# Altium footprint library RCW_PcbLib.PcbLib: 61 footprints (part 2 of 4)
Each footprint in its own frame and in the unit in brackets; x right, y up, seen from the top. Pads: shape width x height; smd on the part's side, far side on the other; paste and mask are expansions set on the pad; w line width, h text height; cw(c..) or ccw(c..) is an arc to the next point about the centre after c.
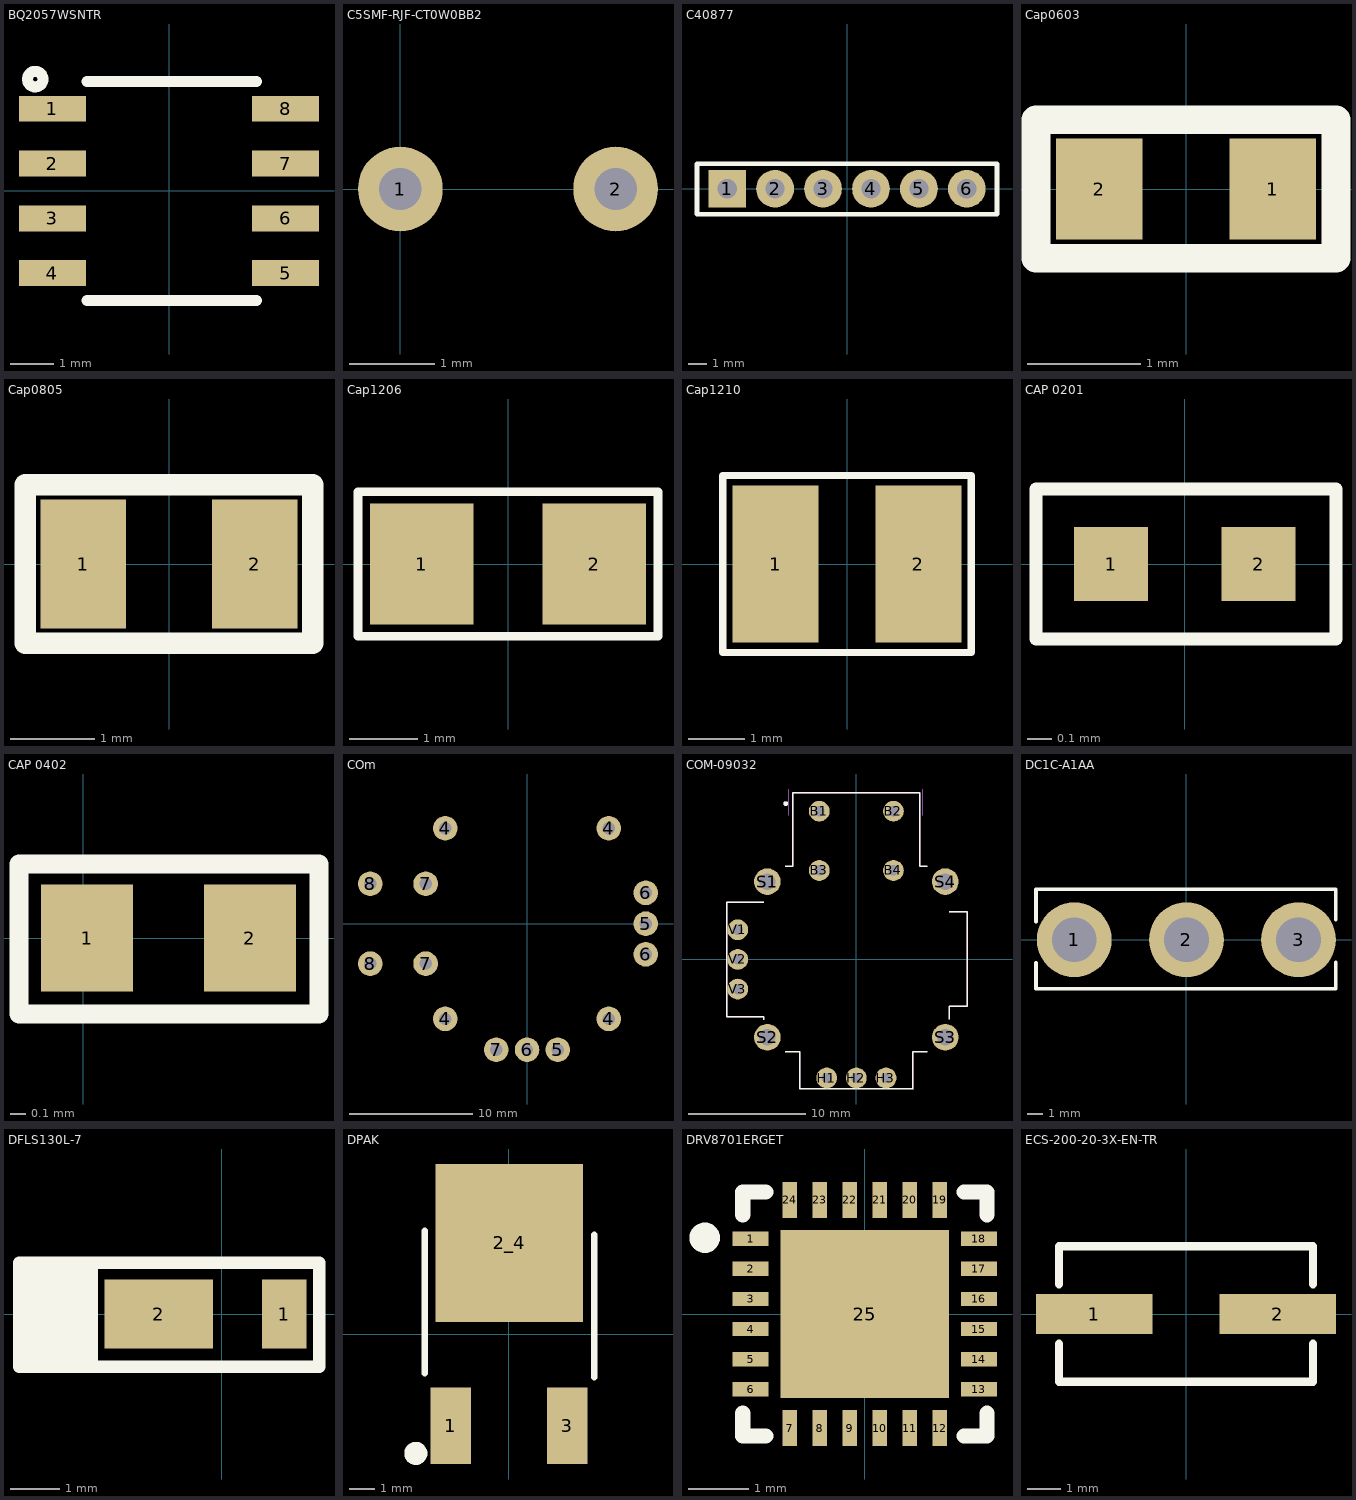
[diagram p1: the footprints below, top view; thin cyan lines are the x and y axes]

## BQ2057WSNTR [mm]
pads (8):
  rect 1.55x0.6 smd: 1(-2.7,1.905) 2(-2.7,0.635) 3(-2.7,-0.635) 4(-2.7,-1.905) 5(2.7,-1.905) 6(2.7,-0.635) 7(2.7,0.635) 8(2.7,1.905)
Top Overlay:
  circle w0.254: c-3.099,2.591 r0.18
  lines w0.254: -1.905,-2.54 2.032,-2.54 ; -1.905,2.54 2.032,2.54
3D body "User Library-SOIC-8-1.STEP": height 1.65, standoff -0.1, extent -2.906,-2.413 3.094,2.487

## C5SMF-RJF-CT0W0BB2 [mm] "LED RED CLEAR 5MM OVAL T/H"
pads (2):
  round 1 hole 0.5: 1(0,0) 2(2.54,0)
3D body "xhp-70.stp": height 0.58, standoff -3.91, extent -2.56,-3.475 4.44,3.525

## C40877 [mm] "Female Header Female Socket 0.100\"(2.54mm)"
pads (6):
  rect 2x2 hole 1.02: 1(-6.35,0)
  round 2 hole 1.02: 2(-3.81,0) 3(-1.27,0) 4(1.27,0) 5(3.81,0) 6(6.35,0)
Top Overlay:
  lines w0.254: -7.95,-1.346 -7.95,1.321 7.95,1.321 7.95,-1.346 -7.95,-1.346
3D body "User Library-Header_Fem_1X6.STEP": height 8.5, standoff -3.2, extent -7.87,-1.27 7.87,1.27

## Cap0603 [mil]
pads (2):
  rect 30x35 smd: 1(30,0) 2(-30,0)
Top Overlay:
  lines w10: -52,-24 -52,24 52,24 52,-24 -52,-24
3D body "User Library-CAPC1608X09.step": height 34.25, standoff -1.18, extent -31.49,-15.74 31.51,15.76

## Cap0805 [mil] "SMD 0805"
pads (2):
  rect 40x60 smd: 1(-40,0) 2(40,0)
Top Overlay:
  lines w10: -67,-37 67,-37 67,37 -67,37 -67,-37
3D body "User Library-0805 SMD Capacitor.step": height 30, standoff -0.79, extent -39.36,-24.6 39.38,24.61

## Cap1206 [mil] "SMD 1206"
pads (2):
  rect 60x70 smd: 1(-50,0) 2(50,0)
Top Overlay:
  lines w5: -87,-42 87,-42 87,42 -87,42 -87,-42
3D body "User Library-1206 SMD Capacitor.step": height 39.45, standoff 0, extent -62.96,-31.46 63.03,31.53

## Cap1210 [mil] "SMD 1210"
pads (2):
  rect 60x110 smd: 1(-50,0) 2(50,0)
Top Overlay:
  lines w5: -87,-62 87,-62 87,62 -87,62 -87,-62
3D body "User Library-CAPC3225X10.step": height 39.37, standoff 0, extent -62.99,-49.21 63,49.22

## CAP 0201 [mm]
pads (2):
  rect 0.3x0.3 smd: 1(-0.3,0) 2(0.3,0)
Top Overlay:
  lines w0.054: -0.605,-0.305 0.614,-0.305 0.614,0.305 -0.605,0.305 -0.605,-0.305
3D body "User Library-SMD Ceramic Capacitors_0201 (0603)_AB.STEP": height 0.28, standoff -0.02, extent -0.3,-0.15 0.301,0.15

## CAP 0402 [mm] "CC0402JRNPO9BN330"
pads (2):
  rect 0.6x0.7 smd: 1(0.025,0) 2(1.085,0)
Top Overlay:
  lines w0.127: -0.419,-0.495 1.537,-0.495 1.537,0.483 -0.419,0.483 -0.419,-0.495
3D body "0402.step": height 0.56, standoff 0, extent -0.007,-0.286 1.111,0.324

## COm [mm]
pads (14):
  round 2 hole 1: 4(-6.65,-7.75) 4(-6.65,7.75) 4(6.65,-7.75) 4(6.65,7.75) 5(2.5,-10.25) 5(9.65,0) 6(0,-10.25) 6(9.65,-2.5) 6(9.65,2.5) 7(-8.25,-3.25) 7(-8.25,3.25) 7(-2.5,-10.25) 8(-12.75,-3.25) 8(-12.75,3.25)
3D body "COM-09032--3DModel-STEP-56544.STEP": height 30.23, standoff -4.44, extent -14.337,-13.357 13.27,13.31

## COM-09032 [mil]
pads (14):
  round 70 hole 35.43: B1(-125,500) B2(125,500) B3(-125,300) B4(125,300)
  round 70 hole 35: H1(-100,-400) H2(0,-400) H3(100,-400) V1(-400,100) V2(-400,0) V3(-400,-100)
  round 90 hole 55: S1(-300,262.5) S2(-300,-262.5) S3(300,-262.5) S4(300,262.5)
Top Overlay:
  circle w7.87: c-238.19,525.59 r3.94
  lines w5: -312.99,-203.54 -312.99,-192.91 -437.01,-192.91 -437.01,192.91 -312.99,192.91 ; -238.98,-311.02 -190.94,-311.02 -190.94,-437 190.94,-437 190.94,-311.02 239.37,-311.02 ; -238.98,314.96 -214.57,314.96 -214.57,562.99 214.57,562.99 214.57,314.96 239.37,314.96 ; 312.99,-201.57 312.99,-157.48 374.02,-157.48 374.02,161.42 312.99,161.42
Mechanical 13:
  circle w7.87: c-238.19,525.59 r3.94
  lines w5: -312.99,-192.91 -437.01,-192.91 -437.01,192.91 -312.99,192.91 ; -214.57,314.96 -214.57,562.99 214.57,562.99 214.57,314.96 ; -190.94,-437.01 -190.94,-311.02 ; 190.94,-437.01 190.94,-311.02 ; 312.99,-157.48 374.02,-157.48 374.02,161.42 312.99,161.42
Mechanical 15:
  lines w1.97: -228.35,486.22 -228.35,574.8 ; 224.41,486.22 224.41,574.8
3D body "COM-09032--3DModel-STEP-56544.STEP": height 1190, standoff -175, extent -531.43,-552.86 518.44,534

## DC1C-A1AA [mm]
pads (3):
  round 5 hole 3: 1(-7.5,0) 2(0,0) 3(7.5,0)
Top Overlay:
  lines w0.254: -10.058,-1.549 -10.058,-3.277 9.982,-3.277 9.982,-1.524 ; -10.058,1.219 -10.058,3.378 9.982,3.378 9.982,1.346
3D body "46867.stp": height 12.01, standoff -2.7, extent -9.95,-3.175 9.9,3.275

## DFLS130L-7 [mm] "30V 1A 310mV @ 1A PowerDI 123 Schottky Barrier Diodes (SBD) RoHS"
pads (2):
  rect 0.9x1.4 smd: 1(1.275,0)
  rect 2.2x1.4 smd: 2(-1.275,0)
Top Overlay:
  rectangle: -4.115,-1.067 -2.515,1.041
  lines w0.254: -4.115,-1.067 -4.115,1.041 1.981,1.041 1.981,-1.067 -4.115,-1.067
3D body "User Library-powerdi123.STEP": height 1, standoff 0, extent -2.256,-0.965 1.619,0.965

## DPAK [mm] "TRANS PNP 100V 3A DPAK"
pads (3):
  rect 1.6x3 smd: 1(-2.285,-3.59) 3(2.285,-3.59)
  rect 5.8x6.2 smd: 2_4(0.007,3.59)
Top Overlay:
  circle w0.5: c-3.658,-4.674 r0.203
  lines w0.254: -3.302,-1.524 -3.302,4.064 ; 3.353,-1.676 3.353,3.912
3D body "User Library-DPAK-1.STEP": height 2.39, standoff -0.02, extent -3.27,-4.287 3.27,5.651

## DRV8701ERGET [mm] "Motor Driver Power MOSFET Parallel 24-VQFN (4x4)"
pads (25):
  rect 0.6x0.24 smd: 1(-1.9,1.25) 2(-1.9,0.75) 3(-1.9,0.25) 4(-1.9,-0.25) 5(-1.9,-0.75) 6(-1.9,-1.25) 13(1.9,-1.25) 14(1.9,-0.75) 15(1.9,-0.25) 16(1.9,0.25) 17(1.9,0.75) 18(1.9,1.25)
  rect 0.24x0.6 smd: 7(-1.25,-1.9) 8(-0.75,-1.9) 9(-0.25,-1.9) 10(0.25,-1.9) 11(0.75,-1.9) 12(1.25,-1.9) 19(1.25,1.9) 20(0.75,1.9) 21(0.25,1.9) 22(-0.25,1.9) 23(-0.75,1.9) 24(-1.25,1.9)
  rect 2.8x2.8 smd: 25(0,0)
Top Overlay:
  circle w0.254: c-2.667,1.27 r0.127
  lines w0.254: -2.032,-1.651 -2.032,-2.032 -1.651,-2.032 ; -2.032,1.651 -2.032,2.032 -1.651,2.032 ; 1.651,-2.032 2.032,-2.032 2.032,-1.651 ; 1.651,2.032 2.032,2.032 2.032,1.651
3D body "User Library-QFN 24 4x4-1.STEP": height 0.9, standoff 0, extent -2.002,-2.002 2.002,2.002

## ECS-200-20-3X-EN-TR [mm] "20MHz ±30ppm Crystal 20pF 50 Ohms HC-49/US"
pads (2):
  rect 3.5x1.2 smd: 1(-2.75,0) 2(2.75,0)
Top Overlay:
  lines w0.254: -3.81,-0.889 -3.81,-2.032 3.81,-2.032 3.81,-0.889 ; -3.81,0.889 -3.81,2.032 3.81,2.032 3.81,0.889
3D body "ECS-120-20-3X-EN-TR--3DModel-STEP-40055.STEP": height 2.3, standoff 0, extent -3.8,-2.05 3.8,2.05